# Altium schematic symbol library 2020-05-10_15-34-12.SchLib: 2 symbols
Pins are listed as number, name and electrical type; pins without a type are passive.

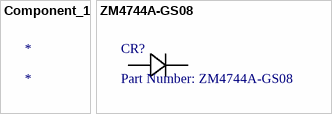
[diagram p0: symbols Component_1 to ZM4744A-GS08]

## Component_1
designator *

## ZM4744A-GS08
designator CR?, comment Part Number: ZM4744A-GS08
No Description Available; Vendor: Vishay; Built_By: EMA_UL_Team; Type: DEV; Manufacturer_Part_Number: ZM4744A-GS08; Copyright: Copyright (C) 2018 Accelerated Designs. All rights reserved; RefDes: RefDes; Value: Value
footprint DIODE_MELF_ZMY
pins: 1, 2